# Altium schematic symbol library DC-005_5521.SchLib: 1 symbol
Pins are listed as number, name and electrical type; pins without a type are passive.

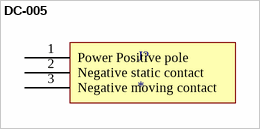
[diagram p0: symbol DC-005]

## DC-005
designator J?
Female Jack
footprint DC-005_5521 (Female Jack DC-005 5.5x2.1mm)
pins: 1 Power Positive pole, 2 Negative static contact, 3 Negative moving contact